# Altium footprint library STPMotorControl_1.PcbLib: 81 footprints (part 4 of 6)
Each footprint in its own frame and in the unit in brackets; x right, y up, seen from the top. Pads: shape width x height; smd on the part's side, far side on the other; paste and mask are expansions set on the pad; w line width, h text height; cw(c..) or ccw(c..) is an arc to the next point about the centre after c.
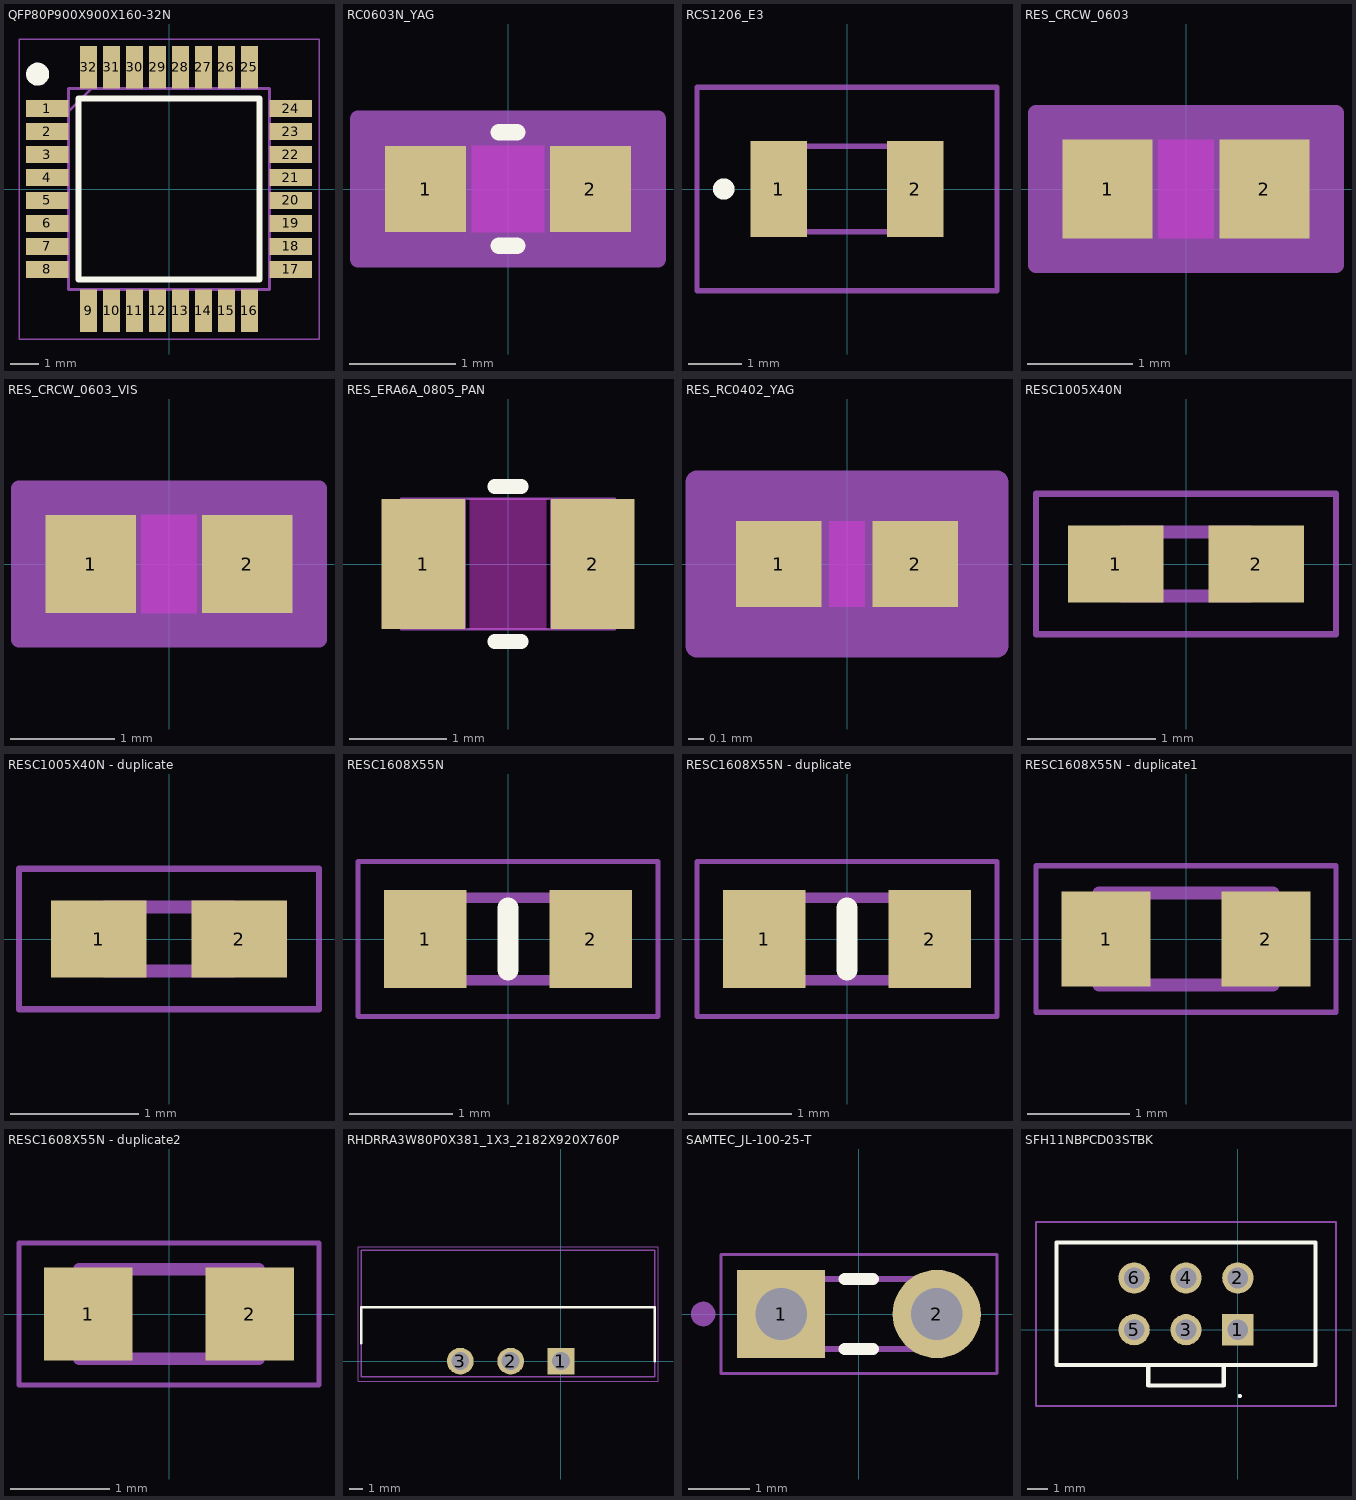
[diagram p3: the footprints below, top view; thin cyan lines are the x and y axes]

## QFP80P900X900X160-32N [mm]
pads (32):
  rect 1.475x0.6 smd: 1(-4.238,2.8) 2(-4.238,2) 3(-4.238,1.2) 4(-4.238,0.4) 5(-4.238,-0.4) 6(-4.238,-1.2) 7(-4.238,-2) 8(-4.238,-2.8) 17(4.238,-2.8) 18(4.238,-2) 19(4.238,-1.2) 20(4.238,-0.4) 21(4.238,0.4) 22(4.238,1.2) 23(4.238,2) 24(4.238,2.8)
  rect 0.6x1.475 smd: 9(-2.8,-4.238) 10(-2,-4.238) 11(-1.2,-4.238) 12(-0.4,-4.238) 13(0.4,-4.238) 14(1.2,-4.238) 15(2,-4.238) 16(2.8,-4.238) 25(2.8,4.238) 26(2,4.238) 27(1.2,4.238) 28(0.4,4.238) 29(-0.4,4.238) 30(-1.2,4.238) 31(-2,4.238) 32(-2.8,4.238)
Top Overlay:
  circle w0.4: c-4.575,4 r0.2
  lines w0.2: -3.15,-3.15 -3.15,3.15 3.15,3.15 3.15,-3.15 -3.15,-3.15
Mechanical 15:
  lines w0.1: -3.5,2.7 -2.7,3.5 ; -3.5,-3.5 -3.5,3.5 3.5,3.5 3.5,-3.5 -3.5,-3.5
Mechanical 20:
  lines w0.05: -5.225,-5.225 -5.225,5.225 5.225,5.225 5.225,-5.225 -5.225,-5.225
3D body "STM32C552KET6.stp": height 1.6, standoff 0, extent -4.5,-4.5 4.5,4.5

## RC0603N_YAG [mil]
pads (2):
  rect 30x32 smd paste+0 mask+0: 1(-30.5,0) 2(30.5,0)
Top Layer keep-out:
  region: -13.5,-14 -13.5,14 13.5,14 13.5,-14
Top Overlay:
  lines w6: -3.39,-21 3.39,-21 ; -3.39,21 3.39,21
  text ".Designator" at -110,45 h50
Keep-Out Layer:
  region: -13.5,-16 -13.5,16 13.5,16 13.5,-16
Mechanical 13:
  lines w1: -31.5,-16 -31.5,16 ; -31.5,-16 31.5,-16 ; -31.5,-16 -15.5,-16 -15.5,16 -31.5,16 ; -31.5,-16 -31.5,16 ; -31.5,16 31.5,16 ; 31.5,-16 31.5,16 ; 31.5,-16 31.5,16 ; 31.5,-16 15.5,-16 15.5,16 31.5,16
  text ".Designator" at -110,45 h50
Mechanical 15:
  region: 55.5,-26 -55.5,-26 -55.5,26 55.5,26
  lines w6: -55.5,-26 55.5,-26 55.5,26 -55.5,26 -55.5,-26
3D body "RC0603N_YAG.step": height 27.99, standoff 0, extent -31.5,-15.98 31.5,15.98

## RCS1206_E3 [mm]
pads (2):
  rect 1.05x1.8 smd: 1(-1.275,0) 2(1.275,0)
Top Overlay:
  lines w0.2: -2.3,-0.1 ccw(c-2.3,0) -2.3,0.1 ccw(c-2.3,0) -2.3,-0.1
Mechanical 13:
  lines w0.1: -1.575,-0.8 -1.575,0.8 1.575,0.8 1.575,-0.8 -1.575,-0.8
Mechanical 15:
  lines w0.1: -2.8,-1.9 -2.8,1.9 2.8,1.9 2.8,-1.9 -2.8,-1.9
3D body "RCS1206120RFKEA.stp": height 0.55, standoff 0, extent -1.6,-0.8 1.6,0.8

## RES_CRCW_0603 [mil]
pads (2):
  rect 33.78x37 smd paste+0 mask+0: 1(-29.39,0) 2(29.39,0)
Top Layer keep-out:
  region: -10.5,-16.5 -10.5,16.5 10.5,16.5 10.5,-16.5
Top Overlay:
  text ".Designator" at -137.5,-25 h50
Keep-Out Layer:
  region: -10.5,-18.5 -10.5,18.5 10.5,18.5 10.5,-18.5
Mechanical 13:
  lines w1: -32.5,-18.5 -32.5,18.5 ; -32.5,-18.5 32.5,-18.5 ; -32.5,-18.5 -12.5,-18.5 -12.5,18.5 -32.5,18.5 ; -32.5,-18.5 -32.5,18.5 ; -32.5,18.5 32.5,18.5 ; 32.5,-18.5 32.5,18.5 ; 32.5,-18.5 32.5,18.5 ; 32.5,-18.5 12.5,-18.5 12.5,18.5 32.5,18.5
  text ".Designator" at -137.5,-25 h50
Mechanical 15:
  region: 56.28,-28.5 -56.28,-28.5 -56.28,28.5 56.28,28.5
  lines w6: -56.28,-28.5 56.28,-28.5 56.28,28.5 -56.28,28.5 -56.28,-28.5
3D body "RES_CRCW_0603.step": height 20, standoff 0, extent -32.52,-18.5 32.52,18.5

## RES_CRCW_0603_VIS [mil]
pads (2):
  rect 34x37 smd paste+0 mask+0: 1(-29.5,0) 2(29.5,0)
Top Layer keep-out:
  region: -10.5,-16.5 -10.5,16.5 10.5,16.5 10.5,-16.5
Top Overlay:
  text ".Designator" at -130,55 h50
Keep-Out Layer:
  region: -10.5,-18.5 -10.5,18.5 10.5,18.5 10.5,-18.5
Mechanical 13:
  lines w1: -32.5,-18.5 -32.5,18.5 ; -32.5,-18.5 32.5,-18.5 ; -32.5,-18.5 -12.5,-18.5 -12.5,18.5 -32.5,18.5 ; -32.5,-18.5 -32.5,18.5 ; -32.5,18.5 32.5,18.5 ; 32.5,-18.5 32.5,18.5 ; 32.5,-18.5 32.5,18.5 ; 32.5,-18.5 12.5,-18.5 12.5,18.5 32.5,18.5
  text ".Designator" at -130,55 h50
Mechanical 15:
  region: 56.5,-28.5 -56.5,-28.5 -56.5,28.5 56.5,28.5
  lines w6: -56.5,-28.5 56.5,-28.5 56.5,28.5 -56.5,28.5 -56.5,-28.5
3D body "RES_CRCW_0603_VIS.step": height 20, standoff 0, extent -32.52,-18.5 32.52,18.5

## RES_ERA6A_0805_PAN [mil]
pads (2):
  rect 34x53 smd paste+0 mask+0: 1(-34.5,0) 2(34.5,0)
Top Layer keep-out:
  region: -15.5,-24.5 -15.5,24.5 15.5,24.5 15.5,-24.5
Top Overlay:
  lines w6: -5.39,-31.5 5.39,-31.5 ; -5.39,31.5 5.39,31.5
Keep-Out Layer:
  region: -15.5,-26.5 -15.5,26.5 15.5,26.5 15.5,-26.5
Mechanical 13:
  lines w1: -43.5,-26.5 -43.5,26.5 ; -43.5,-26.5 43.5,-26.5 ; -43.5,-26.5 -17.5,-26.5 -17.5,26.5 -43.5,26.5 ; -43.5,-26.5 -43.5,26.5 ; -43.5,26.5 43.5,26.5 ; 43.5,-26.5 43.5,26.5 ; 43.5,-26.5 43.5,26.5 ; 43.5,-26.5 17.5,-26.5 17.5,26.5 43.5,26.5
3D body "RES_ERA6A_0805_PAN.step": height 24.02, standoff 0, extent -43.5,-26.5 43.5,26.5

## RES_RC0402_YAG [mil]
pads (2):
  rect 22x22 smd paste+0 mask+0: 1(-17.5,0) 2(17.5,0)
Top Layer keep-out:
  region: -4.5,-9 -4.5,9 4.5,9 4.5,-9
Top Overlay:
  text ".Designator" at -115,-80 h50
Keep-Out Layer:
  region: -4.5,-11 -4.5,11 4.5,11 4.5,-11
Mechanical 13:
  lines w1: -20.5,-11 -20.5,11 ; -20.5,-11 -6.5,-11 -6.5,11 -20.5,11 ; -20.5,-11 20.5,-11 ; -20.5,-11 -20.5,11 ; -20.5,11 20.5,11 ; 20.5,-11 6.5,-11 6.5,11 20.5,11 ; 20.5,-11 20.5,11 ; 20.5,-11 20.5,11
  text ".Designator" at -115,-80 h50
Mechanical 15:
  region: 38.5,-21 -38.5,-21 -38.5,21 38.5,21
  lines w6: -38.5,-21 -38.5,21 38.5,21 38.5,-21 -38.5,-21
3D body "RES_RC0402_YAG.step": height 15.98, standoff 0, extent -20.51,-10.98 20.51,10.98

## RESC1005X40N [mm]
pads (2):
  rect 0.75x0.6 smd: 1(-0.55,0) 2(0.55,0)
Mechanical 15:
  lines w0.1: -0.5,-0.25 -0.5,0.25 0.5,0.25 0.5,-0.25 -0.5,-0.25
Mechanical 20:
  lines w0.05: -1.175,-0.55 -1.175,0.55 1.175,0.55 1.175,-0.55 -1.175,-0.55
3D body "RC0402JR070RL.stp": height 0.4, standoff 0, extent -0.51,-0.245 0.49,0.255

## RESC1005X40N - duplicate [mm]
pads (2):
  rect 0.75x0.6 smd: 1(-0.55,0) 2(0.55,0)
Mechanical 13:
  lines w0.1: -0.5,-0.25 -0.5,0.25 0.5,0.25 0.5,-0.25 -0.5,-0.25
Mechanical 15:
  lines w0.05: -1.175,-0.55 -1.175,0.55 1.175,0.55 1.175,-0.55 -1.175,-0.55
3D body "RC0402FR-0747KL.stp": height 0.4, standoff 0, extent -0.5,-0.25 0.5,0.25

## RESC1608X55N [mm]
pads (2):
  rect 0.8x0.95 smd: 1(-0.8,0) 2(0.8,0)
Top Overlay:
  lines w0.2: 0,-0.3 0,0.3
Mechanical 15:
  lines w0.1: -0.8,-0.4 0.8,-0.4 0.8,0.4 -0.8,0.4 -0.8,-0.4
Mechanical 20:
  lines w0.05: -1.45,-0.75 1.45,-0.75 1.45,0.75 -1.45,0.75 -1.45,-0.75
3D body "RC0603FR0710KL.stp": height 0.45, standoff 0, extent -0.8,-0.4 0.8,0.4

## RESC1608X55N - duplicate [mm]
pads (2):
  rect 0.8x0.95 smd: 1(-0.8,0) 2(0.8,0)
Top Overlay:
  lines w0.2: 0,-0.3 0,0.3
Mechanical 13:
  lines w0.1: -0.8,-0.4 -0.8,0.4 0.8,0.4 0.8,-0.4 -0.8,-0.4
Mechanical 15:
  lines w0.05: -1.45,-0.75 -1.45,0.75 1.45,0.75 1.45,-0.75 -1.45,-0.75
3D body "RC0603FR-075K1L.stp": height 0.46, standoff 0, extent -0.8,-0.4 0.8,0.4

## RESC1608X55N - duplicate1 [mm]
pads (2):
  rect 0.87x0.93 smd: 1(-0.78,0) 2(0.78,0)
Mechanical 13:
  lines w0.127: -0.85,-0.45 -0.85,0.45 0.85,0.45 0.85,-0.45 -0.85,-0.45
Mechanical 15:
  lines w0.05: -1.465,-0.715 -1.465,0.715 1.465,0.715 1.465,-0.715 -1.465,-0.715
3D body "step_temp.STEP": height 0.55, standoff 0, extent -0.8,-0.4 0.8,0.4

## RESC1608X55N - duplicate2 [mm]
pads (2):
  rect 0.89x0.93 smd: 1(-0.814,0) 2(0.814,0)
Mechanical 13:
  lines w0.127: -0.9,-0.45 0.9,-0.45 0.9,0.45 -0.9,0.45 -0.9,-0.45
Mechanical 15:
  lines w0.05: -1.508,-0.715 1.508,-0.715 1.508,0.715 -1.508,0.715 -1.508,-0.715

## RHDRRA3W80P0X381_1X3_2182X920X760P [mm]
pads (3):
  rect 2.025x2.025 hole 1.35: 1(0,0)
  round 2.025 hole 1.35: 2(-3.81,0) 3(-7.62,0)
Top Overlay:
  lines w0.2: -15.12,1.362 -15.12,4.088 7.1,4.088 7.1,0
Mechanical 13:
  lines w0.1: -15.12,-1.2 7.1,-1.2 7.1,8.4 -15.12,8.4 -15.12,-1.2
Mechanical 15:
  lines w0.05: -15.37,-1.512 7.35,-1.512 7.35,8.65 -15.37,8.65 -15.37,-1.512
3D body "TBP02R1W-381-03BE.stp": height 7.2, standoff -3.5, extent -14.92,-1.03 6.9,8.17

## SAMTEC_JL-100-25-T [mm]
pads (2):
  rect 1.44x1.44 hole 0.84: 1(-1.27,0)
  round 1.44 hole 0.84: 2(1.27,0)
Top Overlay:
  lines w0.2: -0.23,-0.57 0.23,-0.57 ; -0.23,0.57 0.23,0.57
Mechanical 13:
  circle w0.2: c-2.54,0 r0.1
  circle w0.2: c-2.54,0 r0.1
  lines w0.1: -1.27,-0.57 1.27,-0.57 1.27,0.57 -1.27,0.57 -1.27,-0.57
Mechanical 15:
  lines w0.05: -2.25,-0.97 -2.25,0.97 2.25,0.97 2.25,-0.97 -2.25,-0.97

## SFH11NBPCD03STBK [mm]
pads (6):
  rect 1.53x1.53 hole 1.02: 1(0,0)
  round 1.53 hole 1.02: 2(0,2.54) 3(-2.54,0) 4(-2.54,2.54) 5(-5.08,0) 6(-5.08,2.54)
Top Overlay:
  lines w0.1: 0.1,-3.3 cw(c0.1,-3.25) 0.1,-3.2 cw(c0.1,-3.25) 0.1,-3.3
  lines w0.2: -4.39,-1.73 -4.39,-2.73 -0.69,-2.73 -0.69,-1.73 ; -8.89,-1.73 3.81,-1.73 3.81,4.27 -8.89,4.27 -8.89,-1.73
Mechanical 13:
  lines w0.1: -4.39,-1.73 -4.39,-2.73 -0.69,-2.73 -0.69,-1.73 ; -8.89,-1.73 3.81,-1.73 3.81,4.27 -8.89,4.27 -8.89,-1.73
Mechanical 15:
  lines w0.1: -9.89,-3.73 4.81,-3.73 4.81,5.27 -9.89,5.27 -9.89,-3.73